# Altium footprint library amirlib.PcbLib: 456 footprints (part 13 of 29)
Each footprint in its own frame and in the unit in brackets; x right, y up, seen from the top. Pads: shape width x height; smd on the part's side, far side on the other; paste and mask are expansions set on the pad; w line width, h text height; cw(c..) or ccw(c..) is an arc to the next point about the centre after c.
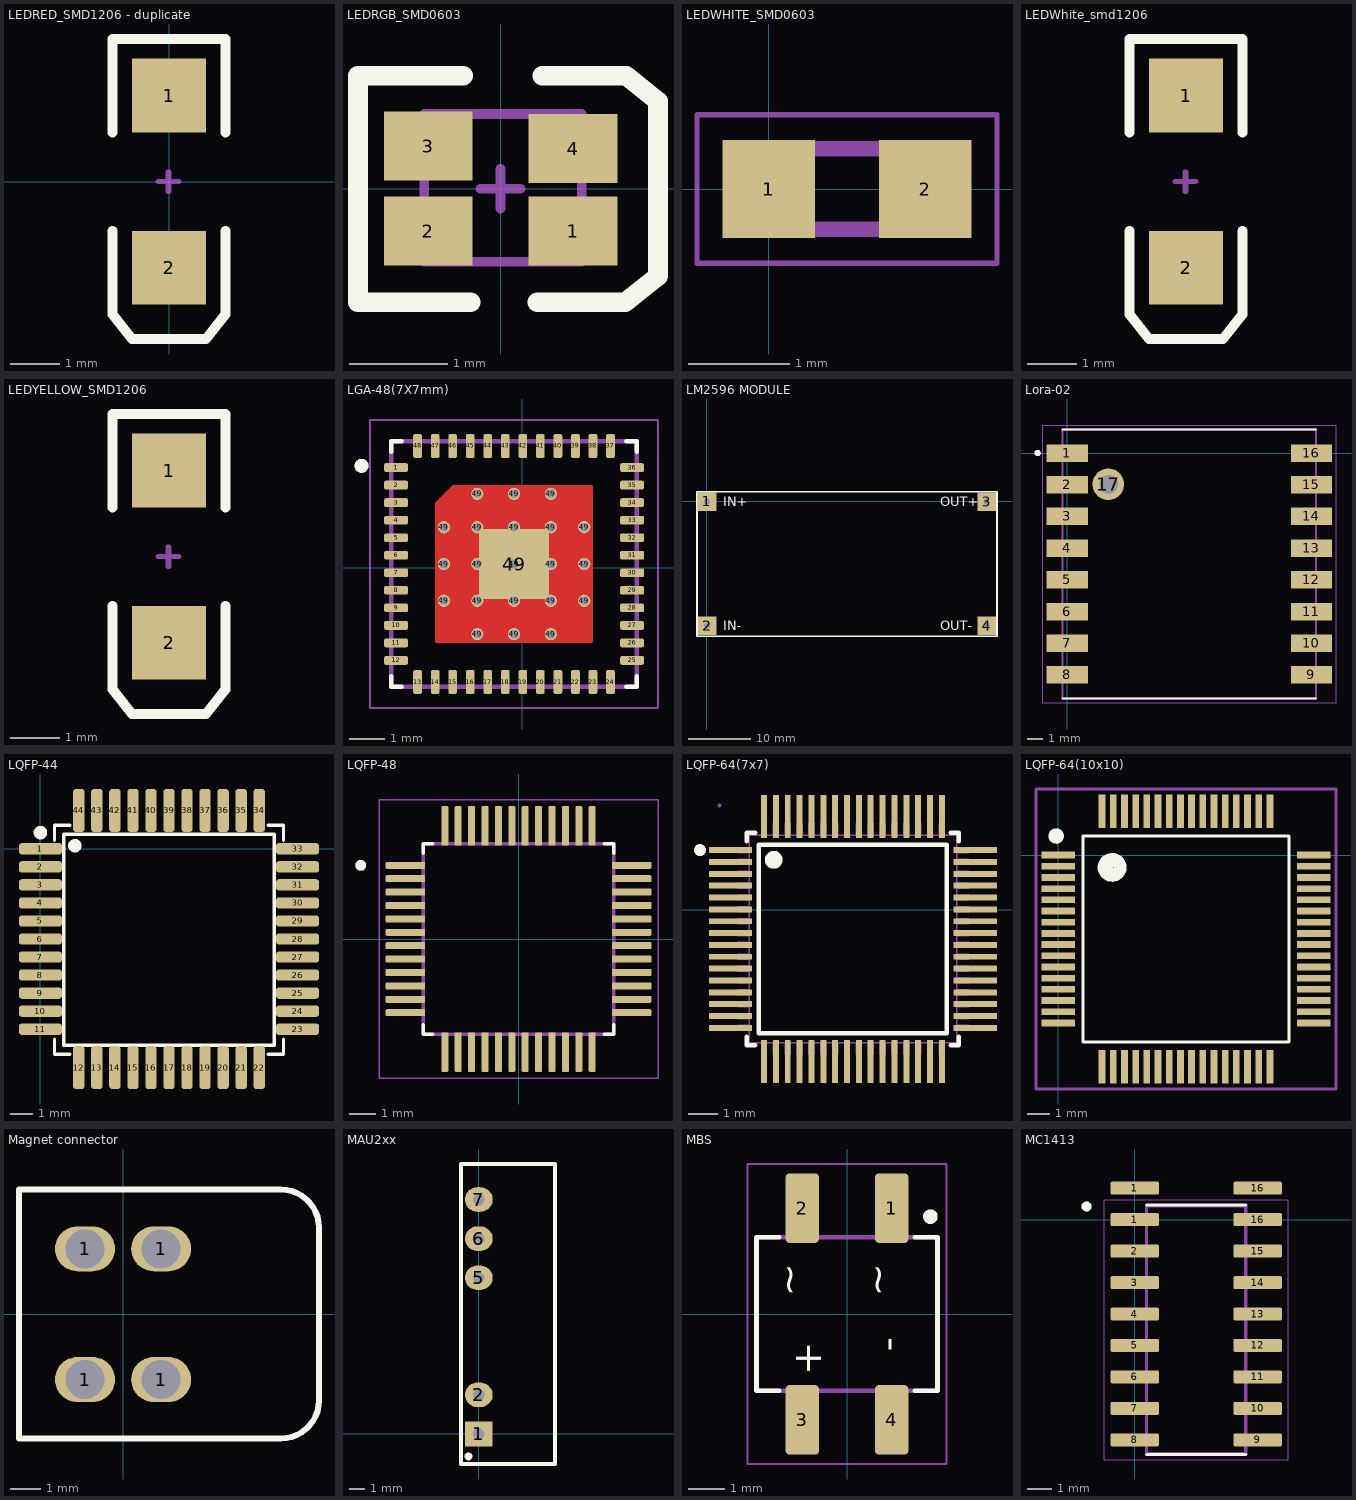
[diagram p12: the footprints below, top view; thin cyan lines are the x and y axes]

## LEDRED_SMD1206 - duplicate [mm]
pads (2):
  rect 1.5x1.5 smd: 1(0,1.75) 2(0,-1.75)
Top Overlay:
  lines w0.2: -1.15,-1 -1.15,-2.7 -0.75,-3.2 0.75,-3.2 1.15,-2.7 1.15,-1 ; -1.15,1 -1.15,2.9 1.15,2.9 1.15,1
Mechanical 1:
  lines w0.1: -0.225,0 0.175,0 ; -0.2,0 0.2,0 ; -0.025,-0.2 -0.025,0.2 ; 0,-0.2 0,0.2
3D body "SW3dPS-LED_SMD_SML010L_Red.STEP": height 1.36, standoff 0.01, extent -0.762,-1.65 0.688,1.65

## LEDRGB_SMD0603 [mm]
pads (4):
  rect 0.9x0.7 smd: 1(0.737,-0.432) 2(-0.737,-0.432) 3(-0.737,0.432) 4(0.737,0.406)
Top Overlay:
  lines w0.2: -0.381,1.147 -1.448,1.147 -1.448,-1.153 -0.305,-1.153 ; 0.375,-1.153 1.269,-1.153 1.6,-0.888 1.6,0.888 1.277,1.147 0.425,1.147
Mechanical 15:
  lines w0.1: -0.737,0.491 -0.47,0.758 ; -0.203,0 0,0 ; 0,-0.203 0,0 ; 0,0.203 0,0 ; 0.203,0 0,0 ; -0.775,-0.742 0.825,-0.742 0.825,-0.108 0.825,0.758 -0.775,0.758 -0.775,-0.108 -0.775,-0.742
3D body "User Library-LED_0605.STEP": height 0.55, standoff 0, extent -0.8,-0.75 0.8,0.75

## LEDWHITE_SMD0603 [mm]
pads (2):
  rect 0.92x0.97 smd: 1(0,0) 2(1.55,0)
Mechanical 13:
  lines w0.152: -0.025,-0.4 1.575,-0.4 1.575,0.4 -0.025,0.4 -0.025,-0.4
Mechanical 15:
  lines w0.05: -0.71,-0.735 -0.71,0.735 2.26,0.735 2.26,-0.735 -0.71,-0.735
3D body "step_temp.STEP": height 0.6, standoff 0, extent -0.025,-0.4 1.575,0.4

## LEDWhite_smd1206 [mm]
pads (2):
  rect 1.5x1.5 smd: 1(29,8.3) 2(29,4.8)
Top Overlay:
  lines w0.2: 27.85,5.55 27.85,3.85 28.25,3.35 29.75,3.35 30.15,3.85 30.15,5.55 ; 27.85,7.55 27.85,9.45 30.15,9.45 30.15,7.55
Mechanical 1:
  lines w0.1: 28.775,6.55 29.175,6.55 ; 28.8,6.55 29.2,6.55 ; 28.975,6.35 28.975,6.75 ; 29,6.35 29,6.75
3D body "User Library-FYLS-1206.STEP": height 1.1, standoff 0, extent 28.21,4.898 29.81,8.098

## LEDYELLOW_SMD1206 [mm]
pads (2):
  rect 1.5x1.5 smd: 1(237.125,-566.275) 2(237.125,-569.775)
Top Overlay:
  lines w0.2: 235.975,-569.025 235.975,-570.725 236.375,-571.225 237.875,-571.225 238.275,-570.725 238.275,-569.025 ; 235.975,-567.025 235.975,-565.125 238.275,-565.125 238.275,-567.025
Mechanical 1:
  lines w0.1: 236.9,-568.025 237.3,-568.025 ; 236.925,-568.025 237.325,-568.025 ; 237.1,-568.225 237.1,-567.825 ; 237.125,-568.225 237.125,-567.825
3D body "User Library-LED1206Y.STEP": height 1.11, standoff -0.4, extent 236.3,-569.55 237.9,-566.35

## LGA-48(7X7mm) [mm]
pads (70):
  rrect40% 0.68x0.25 smd paste-1 mask+0: 1(-3.594,2.852) 2(-3.594,2.352) 3(-3.594,1.852) 4(-3.594,1.352) 5(-3.594,0.852) 6(-3.594,0.352) 7(-3.594,-0.148) 8(-3.594,-0.648) 9(-3.594,-1.148) 10(-3.594,-1.648) 11(-3.594,-2.148) 12(-3.594,-2.648) 25(3.136,-2.648) 26(3.136,-2.148) 27(3.136,-1.648) 28(3.136,-1.148) 29(3.136,-0.648) 30(3.136,-0.148) 31(3.136,0.352) 32(3.136,0.852) 33(3.136,1.352) 34(3.136,1.852) 35(3.136,2.352) 36(3.136,2.852)
  rrect40% 0.25x0.68 smd paste-1 mask+0: 13(-2.979,-3.263) 14(-2.479,-3.263) 15(-1.979,-3.263) 16(-1.479,-3.263) 17(-0.979,-3.263) 18(-0.479,-3.263) 19(0.021,-3.263) 20(0.521,-3.263) 21(1.021,-3.263) 22(1.521,-3.263) 23(2.021,-3.263) 24(2.521,-3.263) 37(2.521,3.467) 38(2.021,3.467) 39(1.521,3.467) 40(1.021,3.467) 41(0.521,3.467) 42(0.021,3.467) 43(-0.479,3.467) 44(-0.979,3.467) 45(-1.479,3.467) 46(-1.979,3.467) 47(-2.479,3.467) 48(-2.979,3.467)
  round 0.35 hole 0.25 mask+0: 49(-2.229,-0.948) 49(-2.229,0.102) 49(-2.229,1.152) 49(-1.279,-1.898) 49(-1.279,-0.948) 49(-1.279,0.102) 49(-1.279,1.152) 49(-1.279,2.102) 49(-0.229,-1.898) 49(-0.229,-0.948) 49(-0.229,0.102) 49(-0.229,1.152) 49(-0.229,2.102) 49(0.821,-1.898) 49(0.821,-0.948) 49(0.821,0.102) 49(0.821,1.152) 49(0.821,2.102) 49(1.771,-0.948) 49(1.771,0.102) 49(1.771,1.152)
  rect 2x2 smd paste-2 mask+0: 49(-0.229,0.102)
Top Layer:
  region: 1.979,2.351 1.981,2.351 1.984,2.35 1.986,2.35 1.989,2.349 1.991,2.348 1.994,2.347 1.996,2.345 1.998,2.344 2,2.342 2.002,2.341 2.004,2.339 2.006,2.337 2.008,2.335 2.01,2.333 2.011,2.331 2.013,2.329 2.014,2.327 2.016,2.325 2.017,2.322 2.018,2.32 2.019,2.317 2.019,2.315 2.02,2.312 2.02,2.31 2.021,2.307 2.021,2.305 2.021,2.302 2.021,-2.098 2.021,-2.101 2.021,-2.103 2.02,-2.106 2.02,-2.108 2.019,-2.111 2.019,-2.113 2.018,-2.116 2.017,-2.118 2.016,-2.121 2.014,-2.123 2.013,-2.125 2.011,-2.127 2.01,-2.129 2.008,-2.131 2.006,-2.133 2.004,-2.135 2.002,-2.137 2,-2.138 1.998,-2.14 1.996,-2.141 1.994,-2.143 1.991,-2.144 1.989,-2.145 1.986,-2.146 1.984,-2.146 1.981,-2.147 1.979,-2.147 1.976,-2.148 -2.434,-2.148 -2.437,-2.147 -2.439,-2.147 -2.442,-2.146 -2.444,-2.146 -2.447,-2.145 -2.449,-2.144 -2.452,-2.143 -2.454,-2.141 -2.456,-2.14 -2.458,-2.138 -2.46,-2.137 -2.462,-2.135 -2.464,-2.133 -2.466,-2.131 -2.468,-2.129 -2.469,-2.127 -2.471,-2.125 -2.472,-2.123 -2.474,-2.121 -2.475,-2.118 -2.476,-2.116 -2.477,-2.113 -2.477,-2.111 -2.478,-2.108 -2.478,-2.106 -2.479,-2.103 -2.479,-2.101 -2.479,-2.098 -2.479,1.852 -1.979,2.352 1.976,2.352
Top Overlay:
  circle w0.2: c-4.579,2.902 r0.1
  lines w0.127: -3.729,-3.098 -3.729,-3.398 -3.429,-3.398 ; -3.729,3.302 -3.729,3.602 -3.429,3.602 ; 2.971,-3.398 3.271,-3.398 3.271,-3.098 ; 2.971,3.602 3.271,3.602 3.271,3.302
Top Paste:
  drawing of 64 lines, arcs and shapes, not listed
Top Solder:
  drawing of 49 lines, arcs and shapes, not listed
Mechanical 13:
  circle w0.2: c-4.579,2.902 r0.1
  lines w0.127: -3.729,-3.398 3.271,-3.398 3.271,3.602 -3.729,3.602 -3.729,-3.398
Mechanical 15:
  lines w0.05: -4.334,-4.003 -4.334,4.207 3.876,4.207 3.876,-4.003 -4.334,-4.003
3D body "step_temp.STEP": height 1.21, standoff 0, extent -3.729,-3.398 3.271,3.602

## LM2596 MODULE [mm]
pads (4):
  rect 3x3 hole 1: 1(0,0) 2(0.051,-19.964) 3(44.983,-0.051) 4(44.983,-19.99)
Top Overlay:
  lines w0.254: -1.6,-21.666 46.66,-21.666 46.66,1.549 -1.6,1.549 -1.6,-21.666
  text "IN+" at 2.616,-0.737 h1.52
  text "IN-" at 2.616,-20.701 h1.52
  text "OUT-" at 37.541,-20.701 h1.52
  text "OUT+" at 37.541,-0.737 h1.52
3D body "User Library-LM2596_DC-DC_CONVERTER.STEP": height 13.09, standoff -0.72, extent -1.521,-21.514 46.479,1.486

## Lora-02 [mm]
pads (17):
  rect 2.6x1.1 smd: 1(0,0) 2(0,-2) 3(0,-4) 4(0,-6) 5(0,-8) 6(0,-10) 7(0,-12) 8(0,-14) 9(15.4,-14) 10(15.4,-12) 11(15.4,-10) 12(15.4,-8) 13(15.4,-6) 14(15.4,-4) 15(15.4,-2) 16(15.4,0)
  round 2 hole 1.2: 17(2.591,-1.974)
Top Overlay:
  circle w0.2: c-1.876,0 r0.1
  lines w0.127: -0.3,-15.5 15.7,-15.5 ; -0.3,1.5 15.7,1.5
Mechanical 13:
  circle w0.2: c-1.876,0 r0.1
  lines w0.127: -0.3,-15.5 15.7,-15.5 15.7,1.5 -0.3,1.5 -0.3,-15.5
Mechanical 15:
  lines w0.05: -1.55,-15.75 16.95,-15.75 16.95,1.75 -1.55,1.75 -1.55,-15.75
3D body "Ra-02 LoRa--3DModel-STEP-1.STEP": height 3.3, standoff 0, extent -0.3,-15.509 15.7,1.491

## LQFP-44 [mm]
pads (44):
  rrect50% 1.9x0.5 smd: 1(0,0) 2(0,-0.8) 3(0,-1.6) 4(0,-2.4) 5(0,-3.2) 6(0,-4) 7(0,-4.8) 8(0,-5.6) 9(0,-6.4) 10(0,-7.2) 11(0,-8) 23(11.4,-8) 24(11.4,-7.2) 25(11.4,-6.4) 26(11.4,-5.6) 27(11.4,-4.8) 28(11.4,-4) 29(11.4,-3.2) 30(11.4,-2.4) 31(11.4,-1.6) 32(11.4,-0.8) 33(11.4,0)
  rrect50% 0.5x1.9 smd: 12(1.7,-9.7) 13(2.5,-9.7) 14(3.3,-9.7) 15(4.1,-9.7) 16(4.9,-9.7) 17(5.7,-9.7) 18(6.5,-9.7) 19(7.3,-9.7) 20(8.1,-9.7) 21(8.9,-9.7) 22(9.7,-9.7) 34(9.7,1.7) 35(8.9,1.7) 36(8.1,1.7) 37(7.3,1.7) 38(6.5,1.7) 39(5.7,1.7) 40(4.9,1.7) 41(4.1,1.7) 42(3.3,1.7) 43(2.5,1.7) 44(1.7,1.7)
Top Overlay:
  circle w0.3: c1.529,0.136 r0.15
  circle w0.3: c0,0.715 r0.15
  lines w0.152: 0.624,-8.435 0.624,-9.111 1.299,-9.111 ; 0.624,0.366 0.624,1.041 1.299,1.041 ; 10.1,-9.111 10.776,-9.111 10.776,-8.435 ; 10.1,1.041 10.776,1.041 10.776,0.366 ; 1.029,-8.706 1.029,0.636 10.371,0.636 10.371,-8.706 1.029,-8.706
3D body "HT67F489_Holtek_LQFP44_FP3.2.step": height 1.59, standoff 0, extent -0.9,-10.6 12.3,2.6

## LQFP-48 [mm]
pads (48):
  rrect25% 1.47x0.26 smd: 1(-4.22,2.75) 2(-4.22,2.25) 3(-4.22,1.75) 4(-4.22,1.25) 5(-4.22,0.75) 6(-4.22,0.25) 7(-4.22,-0.25) 8(-4.22,-0.75) 9(-4.22,-1.25) 10(-4.22,-1.75) 11(-4.22,-2.25) 12(-4.22,-2.75) 25(4.22,-2.75) 26(4.22,-2.25) 27(4.22,-1.75) 28(4.22,-1.25) 29(4.22,-0.75) 30(4.22,-0.25) 31(4.22,0.25) 32(4.22,0.75) 33(4.22,1.25) 34(4.22,1.75) 35(4.22,2.25) 36(4.22,2.75)
  rrect25% 0.26x1.47 smd: 13(-2.75,-4.22) 14(-2.25,-4.22) 15(-1.75,-4.22) 16(-1.25,-4.22) 17(-0.75,-4.22) 18(-0.25,-4.22) 19(0.25,-4.22) 20(0.75,-4.22) 21(1.25,-4.22) 22(1.75,-4.22) 23(2.25,-4.22) 24(2.75,-4.22) 37(2.75,4.22) 38(2.25,4.22) 39(1.75,4.22) 40(1.25,4.22) 41(0.75,4.22) 42(0.25,4.22) 43(-0.25,4.22) 44(-0.75,4.22) 45(-1.25,4.22) 46(-1.75,4.22) 47(-2.25,4.22) 48(-2.75,4.22)
Top Overlay:
  circle w0.2: c-5.89,2.75 r0.1
  lines w0.127: -3.55,-3.2 -3.55,-3.55 -3.2,-3.55 ; -3.55,3.2 -3.55,3.55 -3.2,3.55 ; 3.2,-3.55 3.55,-3.55 3.55,-3.2 ; 3.2,3.55 3.55,3.55 3.55,3.2
Mechanical 13:
  circle w0.2: c-5.89,2.75 r0.1
  lines w0.127: -3.55,-3.55 -3.55,3.55 3.55,3.55 3.55,-3.55 -3.55,-3.55
Mechanical 15:
  lines w0.05: -5.205,-5.205 -5.205,5.205 5.205,5.205 5.205,-5.205 -5.205,-5.205
3D body "step_temp.STEP": height 1.6, standoff 0, extent -4.5,-4.5 4.5,4.5

## LQFP-64(7x7) [mm]
pads (64):
  rect 1.46x0.2 smd: 1(3.332,2.007) 2(3.332,1.607) 3(3.332,1.207) 4(3.332,0.807) 5(3.332,0.407) 6(3.332,0.007) 7(3.332,-0.393) 8(3.332,-0.793) 9(3.332,-1.193) 10(3.332,-1.593) 11(3.332,-1.993) 12(3.332,-2.393) 13(3.332,-2.793) 14(3.332,-3.193) 15(3.332,-3.593) 16(3.332,-3.993) 33(11.592,-3.993) 34(11.592,-3.593) 35(11.592,-3.193) 36(11.592,-2.793) 37(11.592,-2.393) 38(11.592,-1.993) 39(11.592,-1.593) 40(11.592,-1.193) 41(11.592,-0.793) 42(11.592,-0.393) 43(11.592,0.007) 44(11.592,0.407) 45(11.592,0.807) 46(11.592,1.207) 47(11.592,1.607) 48(11.592,2.007)
  rect 0.2x1.46 smd: 17(4.462,-5.123) 18(4.862,-5.123) 19(5.262,-5.123) 20(5.662,-5.123) 21(6.062,-5.123) 22(6.462,-5.123) 23(6.862,-5.123) 24(7.262,-5.123) 25(7.662,-5.123) 26(8.062,-5.123) 27(8.462,-5.123) 28(8.862,-5.123) 29(9.262,-5.123) 30(9.662,-5.123) 31(10.062,-5.123) 32(10.462,-5.123) 49(10.462,3.137) 50(10.062,3.137) 51(9.662,3.137) 52(9.262,3.137) 53(8.862,3.137) 54(8.462,3.137) 55(8.062,3.137) 56(7.662,3.137) 57(7.262,3.137) 58(6.862,3.137) 59(6.462,3.137) 60(6.062,3.137) 61(5.662,3.137) 62(5.262,3.137) 63(4.862,3.137) 64(4.462,3.137)
Top Overlay:
  circle w0.2: c2.302,2.007 r0.1
  circle w0.3: c4.791,1.679 r0.15
  lines w0.152: 3.886,-4.295 3.886,-4.569 4.16,-4.569 ; 3.886,2.31 3.886,2.583 4.16,2.583 ; 10.765,-4.569 11.038,-4.569 11.038,-4.295 ; 10.765,2.583 11.038,2.583 11.038,2.31 ; 4.291,-4.164 10.633,-4.164 10.633,2.179 4.291,2.179 4.291,-4.164
Mechanical 6:
  lines w0.051: 3.962,-4.493 10.962,-4.493 10.962,2.507 3.962,2.507 3.962,-4.493
Mechanical 7:
  drawing of 64 lines, arcs and shapes, not listed
Mechanical 8:
  region: 3.022,3.507 3.022,3.482 2.987,3.447 2.937,3.447 2.902,3.482 2.902,3.507 2.902,3.532 2.937,3.567 2.987,3.567 3.022,3.532
3D body "User Library-LQFP64_7x7mm.STEP": height 1.5, standoff -0.08, extent 2.968,-5.491 11.968,3.509

## LQFP-64(10x10) [mm]
pads (64):
  rect 1.5x0.3 smd: 1(0,0) 2(0,-0.5) 3(0,-1) 4(0,-1.5) 5(0,-2) 6(0,-2.5) 7(0,-3) 8(0,-3.5) 9(0,-4) 10(0,-4.5) 11(0,-5) 12(0,-5.5) 13(0,-6) 14(0,-6.5) 15(0,-7) 16(0,-7.5) 33(11.4,-7.5) 34(11.4,-7) 35(11.4,-6.5) 36(11.4,-6) 37(11.4,-5.5) 38(11.4,-5) 39(11.4,-4.5) 40(11.4,-4) 41(11.4,-3.5) 42(11.4,-3) 43(11.4,-2.5) 44(11.4,-2) 45(11.4,-1.5) 46(11.4,-1) 47(11.4,-0.5) 48(11.4,0)
  rect 0.3x1.5 smd: 17(1.95,-9.45) 18(2.45,-9.45) 19(2.95,-9.45) 20(3.45,-9.45) 21(3.95,-9.45) 22(4.45,-9.45) 23(4.95,-9.45) 24(5.45,-9.45) 25(5.95,-9.45) 26(6.45,-9.45) 27(6.95,-9.45) 28(7.45,-9.45) 29(7.95,-9.45) 30(8.45,-9.45) 31(8.95,-9.45) 32(9.45,-9.45) 49(9.45,1.95) 50(8.95,1.95) 51(8.45,1.95) 52(7.95,1.95) 53(7.45,1.95) 54(6.95,1.95) 55(6.45,1.95) 56(5.95,1.95) 57(5.45,1.95) 58(4.95,1.95) 59(4.45,1.95) 60(3.95,1.95) 61(3.45,1.95) 62(2.95,1.95) 63(2.45,1.95) 64(1.95,1.95)
Top Overlay:
  circle w0.127: c-0.2,0.85 r0.1
  circle w0.127: c-0.1,0.85 r0.141
  circle w0.127: c-0.1,0.85 r0.1
  circle w0.127: c-0.1,0.85 r0.141
  circle w0.127: c-0.1,0.85 r0.224
  circle w0.127: c-0.1,0.85 r0.283
  circle w0.127: c2.3,-0.55 r0.1
  circle w0.127: c2.4,-0.55 r0.224
  circle w0.127: c2.4,-0.55 r0.141
  circle w0.127: c2.4,-0.55 r0.361
  circle w0.127: c2.4,-0.55 r0.283
  circle w0.127: c2.4,-0.55 r0.424
  circle w0.127: c2.4,-0.55 r0.5
  circle w0.127: c2.4,-0.55 r0.566
  circle w0.127: c2.4,-0.55 r0.583
  lines w0.127: 1.1,-8.35 1.1,0.85 10.3,0.85 10.3,-8.35 1.1,-8.35
Mechanical 15:
  lines w0.127: -1,-10.45 -1,2.95 12.4,2.95 12.4,-10.45 -1,-10.45
3D body "step_temp.STEP": height 1.6, standoff 0, extent -0.3,-9.75 11.7,2.25

## Magnet connector [mm]
pads (4):
  oval 2x1.5 hole 1.3: 1(-1.27,-2.179) 1(-1.27,2.179) 1(1.27,-2.179) 1(1.27,2.179)
Top Overlay:
  lines w0.2: -3.47,-4.145 4.53,-4.145 5.26,-4.145 ccw(c5.26,-2.875) 6.53,-2.875 6.53,-2.145 6.53,2.155 6.53,2.885 ccw(c5.26,2.885) 5.26,4.155 4.53,4.155 -3.47,4.155 -3.47,-4.145

## MAU2xx [mm]
pads (5):
  rect 1.8x1.6 hole 0.762: 1(0,0)
  oval 1.8x1.6 hole 0.762: 2(0,2.54) 5(0,10.16) 6(0,12.7) 7(0,15.24)
Top Overlay:
  circle w0.254: c-0.675,-1.46 r0.127
  lines w0.254: -1.154,-1.952 4.946,-1.952 4.946,17.352 4.946,17.548 -1.154,17.548 -1.154,-1.952

## MBS [mm]
pads (4):
  rrect23% 0.91x1.91 smd: 1(1.225,2.9) 2(-1.225,2.9) 3(-1.225,-2.9) 4(1.225,-2.9)
Top Overlay:
  circle w0.2: c2.286,2.667 r0.1
  lines w0.127: -1.86,-2.1 -2.48,-2.1 -2.48,2.1 -1.86,2.1 ; 1.86,-2.1 2.48,-2.1 2.48,2.1 1.86,2.1
  text "-" at 0.889,-0.635 h0.8
  text "+" at -1.397,-0.762 h0.8
  text "~" at 0.508,1.397 h0.8
  text "~" at -1.905,1.397 h0.8
Mechanical 13:
  lines w0.127: -2.48,-2.1 -2.48,2.1 2.48,2.1 2.48,-2.1 -2.48,-2.1
Mechanical 15:
  lines w0.05: -2.73,-4.11 -2.73,4.11 2.73,4.11 2.73,-4.11 -2.73,-4.11
3D body "MB6S.STEP": height 2.9, standoff 0, extent -2.388,-3.375 2.337,3.325

## MC1413 [mm]
pads (18):
  rrect25% 1.95x0.53 smd: 1(0,0) 1(0,1.27) 2(0,-1.27) 3(0,-2.54) 4(0,-3.81) 5(0,-5.08) 6(0,-6.35) 7(0,-7.62) 8(0,-8.89) 9(4.96,-8.89) 10(4.96,-7.62) 11(4.96,-6.35) 12(4.96,-5.08) 13(4.96,-3.81) 14(4.96,-2.54) 15(4.96,-1.27) 16(4.96,0) 16(4.96,1.27)
Top Overlay:
  circle w0.2: c-1.95,0.53 r0.1
  lines w0.127: 0.48,-9.475 4.48,-9.475 ; 0.48,0.585 4.48,0.585
Mechanical 13:
  circle w0.2: c-1.95,0.53 r0.1
  lines w0.127: 0.48,-9.445 4.48,-9.445 4.48,0.555 0.48,0.555 0.48,-9.445
Mechanical 15:
  lines w0.05: -1.225,-9.695 6.185,-9.695 6.185,0.805 -1.225,0.805 -1.225,-9.695
3D body "MC1413DR2G.STEP": height 1.75, standoff 0, extent -0.393,-9.392 5.607,0.508